# Altium footprint library Connector Header 254 Right Angel.PcbLib: 49 footprints (part 2 of 4)
Each footprint in its own frame and in the unit in brackets; x right, y up, seen from the top. Pads: shape width x height; smd on the part's side, far side on the other; paste and mask are expansions set on the pad; w line width, h text height; cw(c..) or ccw(c..) is an arc to the next point about the centre after c.
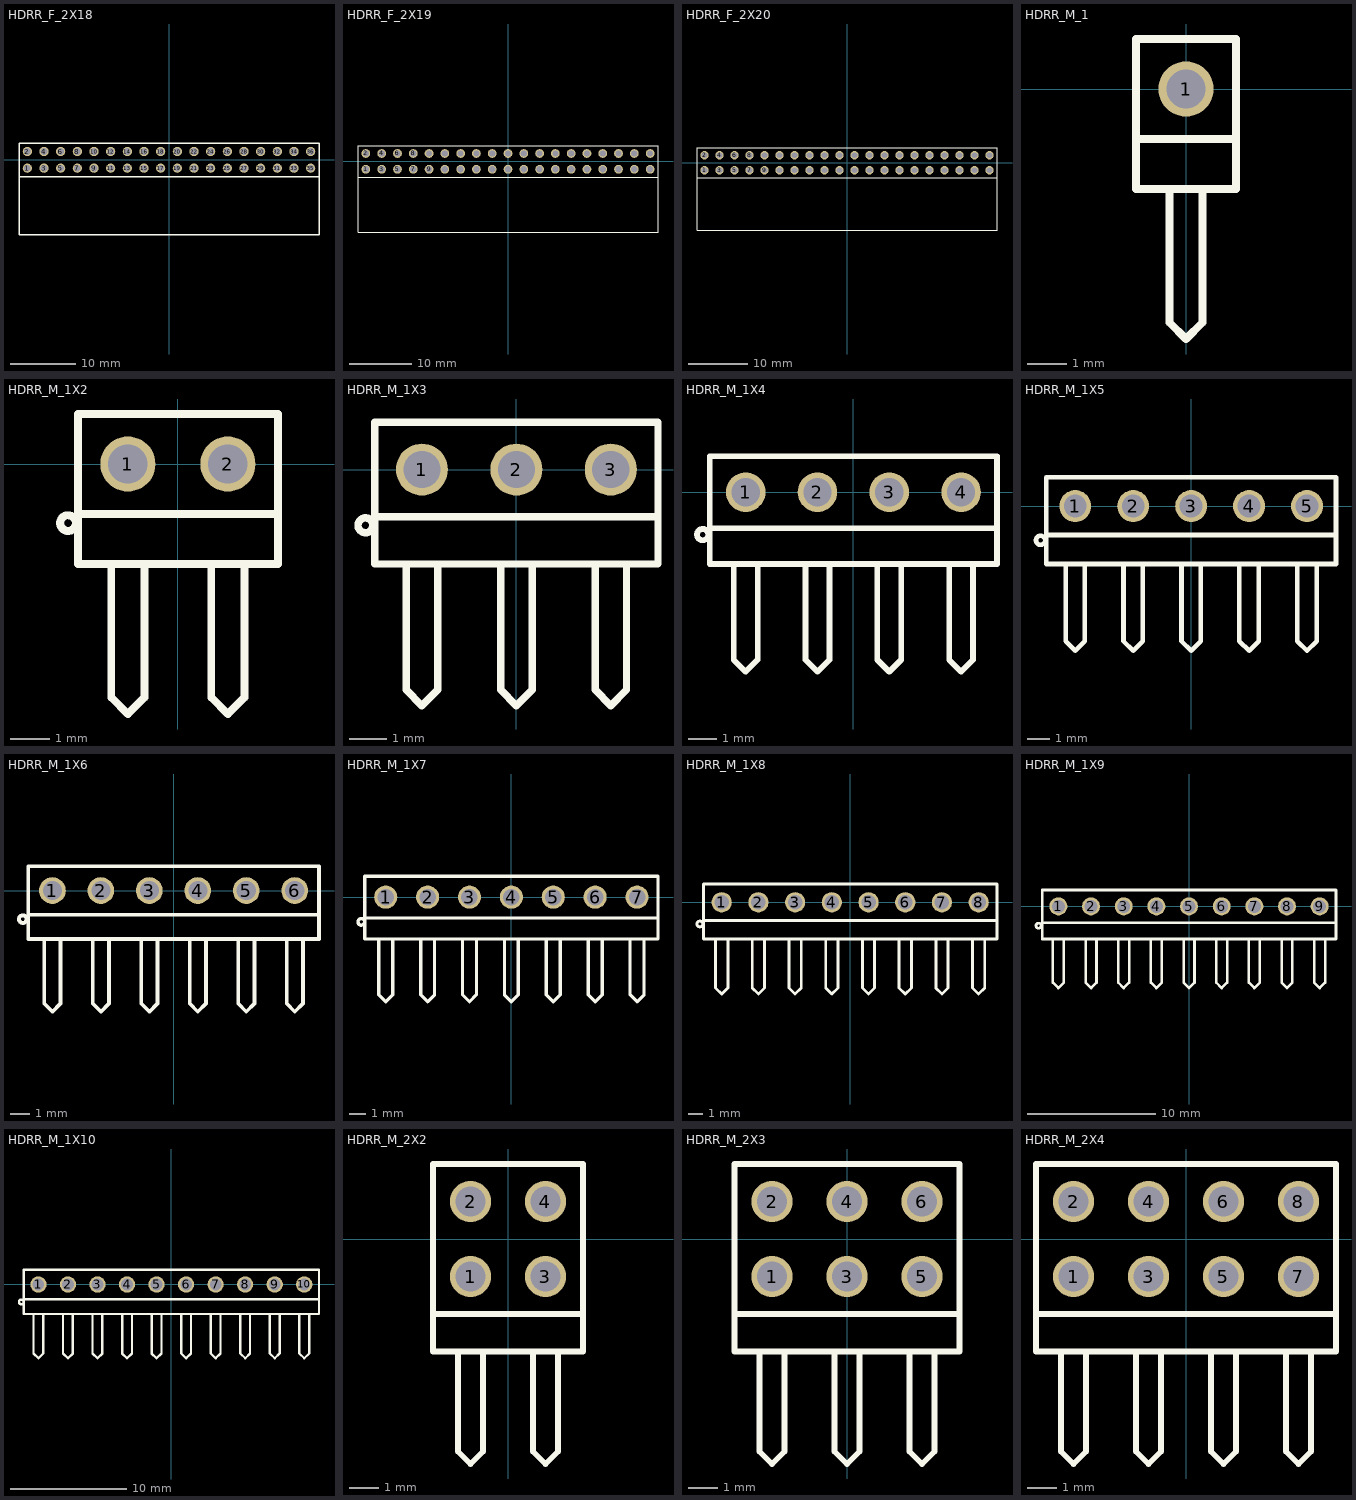
[diagram p1: the footprints below, top view; thin cyan lines are the x and y axes]

## HDRR_F_2X18 [mm] "Connector; Header; 18x2 Position"
height 5
pads (36):
  round 1.4 / inner round 1.4 / far side oval 1.4x2.2 hole 1: 1(-21.59,-1.27) 2(-21.59,1.27) 3(-19.05,-1.27) 4(-19.05,1.27) 5(-16.51,-1.27) 6(-16.51,1.27) 7(-13.97,-1.27) 8(-13.97,1.27) 9(-11.43,-1.27) 10(-11.43,1.27) 11(-8.89,-1.27) 12(-8.89,1.27) 13(-6.35,-1.27) 14(-6.35,1.27) 15(-3.81,-1.27) 16(-3.81,1.27) 17(-1.27,-1.27) 18(-1.27,1.27) 19(1.27,-1.27) 20(1.27,1.27) 21(3.81,-1.27) 22(3.81,1.27) 23(6.35,-1.27) 24(6.35,1.27) 25(8.89,-1.27) 26(8.89,1.27) 27(11.43,-1.27) 28(11.43,1.27) 29(13.97,-1.27) 30(13.97,1.27) 31(16.51,-1.27) 32(16.51,1.27) 33(19.05,-1.27) 34(19.05,1.27) 35(21.59,-1.27) 36(21.59,1.27)
Top Overlay:
  lines w0.2: -22.86,-2.54 -22.86,-11.43 22.86,-11.43 22.86,-2.54 ; -22.86,-2.54 22.86,-2.54 ; -22.86,-2.54 -22.86,2.54 22.86,2.54 22.86,-2.54
3D body "PBD-36R.step": height 5, standoff -3, extent -22.86,-11.43 22.86,1.57

## HDRR_F_2X19 [mm] "Connector; Header; 19x2 Position"
height 5
pads (38):
  round 1.4 / inner round 1.4 / far side oval 1.4x2.2 hole 1: 1(-22.86,-1.27) 2(-22.86,1.27) 3(-20.32,-1.27) 4(-20.32,1.27) 5(-17.78,-1.27) 6(-17.78,1.27) 7(-15.24,-1.27) 8(-15.24,1.27) 9(-12.7,-1.27) 10(-12.7,1.27) 11(-10.16,-1.27) 12(-10.16,1.27) 13(-7.62,-1.27) 14(-7.62,1.27) 15(-5.08,-1.27) 16(-5.08,1.27) 17(-2.54,-1.27) 18(-2.54,1.27) 19(0,-1.27) 20(0,1.27) 21(2.54,-1.27) 22(2.54,1.27) 23(5.08,-1.27) 24(5.08,1.27) 25(7.62,-1.27) 26(7.62,1.27) 27(10.16,-1.27) 28(10.16,1.27) 29(12.7,-1.27) 30(12.7,1.27) 31(15.24,-1.27) 32(15.24,1.27) 33(17.78,-1.27) 34(17.78,1.27) 35(20.32,-1.27) 36(20.32,1.27) 37(22.86,-1.27) 38(22.86,1.27)
Top Overlay:
  lines w0.2: -24.13,-2.54 -24.13,2.54 24.13,2.54 24.13,-2.54 ; -24.13,-2.54 24.13,-2.54 ; -24.13,-2.54 -24.13,-11.43 24.13,-11.43 24.13,-2.54
3D body "PBD-38R.step": height 5, standoff -3, extent -24.13,-11.43 24.13,1.57

## HDRR_F_2X20 [mm] "Connector; Header; 20x2 Position"
height 5
pads (40):
  round 1.4 / inner round 1.4 / far side oval 1.4x2.2 hole 1: 1(-24.13,-1.27) 2(-24.13,1.27) 3(-21.59,-1.27) 4(-21.59,1.27) 5(-19.05,-1.27) 6(-19.05,1.27) 7(-16.51,-1.27) 8(-16.51,1.27) 9(-13.97,-1.27) 10(-13.97,1.27) 11(-11.43,-1.27) 12(-11.43,1.27) 13(-8.89,-1.27) 14(-8.89,1.27) 15(-6.35,-1.27) 16(-6.35,1.27) 17(-3.81,-1.27) 18(-3.81,1.27) 19(-1.27,-1.27) 20(-1.27,1.27) 21(1.27,-1.27) 22(1.27,1.27) 23(3.81,-1.27) 24(3.81,1.27) 25(6.35,-1.27) 26(6.35,1.27) 27(8.89,-1.27) 28(8.89,1.27) 29(11.43,-1.27) 30(11.43,1.27) 31(13.97,-1.27) 32(13.97,1.27) 33(16.51,-1.27) 34(16.51,1.27) 35(19.05,-1.27) 36(19.05,1.27) 37(21.59,-1.27) 38(21.59,1.27) 39(24.13,-1.27) 40(24.13,1.27)
Top Overlay:
  lines w0.2: -25.4,-2.54 -25.4,2.54 25.4,2.54 25.4,-2.54 ; -25.4,-2.54 25.4,-2.54 ; -25.4,-2.54 -25.4,-11.43 25.4,-11.43 25.4,-2.54
3D body "PBD-40R.step": height 5, standoff -3, extent -25.4,-11.43 25.4,1.57

## HDRR_M_1 [mm] "Connector; Header; 1 Position; Right Angle"
height 12
pads (1):
  round 1.4 / inner round 1.4 / far side oval 1.4x2.2 hole 1: 1(0,0)
Top Overlay:
  lines w0.2: -0.423,-2.54 -0.423,-5.927 0,-6.35 0.423,-5.927 0.423,-2.54 ; -1.27,-1.27 1.27,-1.27 ; -1.27,-1.27 -1.27,-2.54 1.27,-2.54 1.27,-1.27 ; -1.27,-1.27 -1.27,1.27 1.27,1.27 1.27,-1.27
3D body "PLS-1R.step": height 5.45, standoff -3, extent -1.27,-7.35 1.27,1.27

## HDRR_M_1X2 [mm] "Connector; Header; 2 Position; Right Angle"
height 12
pads (2):
  round 1.4 / inner round 1.4 / far side oval 1.4x2.2 hole 1: 1(-1.27,0) 2(1.27,0)
Top Overlay:
  circle w0.2: c-2.79,-1.5 r0.2
  lines w0.2: -1.693,-2.54 -1.693,-5.927 -1.27,-6.35 -0.847,-5.927 -0.847,-2.54 ; 0.847,-2.54 0.847,-5.927 1.27,-6.35 1.693,-5.927 1.693,-2.54 ; 2.54,-1.27 -2.54,-1.27 ; -2.54,-2.54 -2.54,-1.27 ; -2.54,-2.54 2.54,-2.54 2.54,1.27 -2.54,1.27 ; -2.54,-2.54 -2.54,1.27 ; -2.54,-1.27 -2.54,1.27
3D body "PLS-1R.step": height 5.45, standoff -3, extent -2.54,-7.35 0,1.27
3D body "PLS-1R.step": height 5.45, standoff -3, extent 0,-7.35 2.54,1.27

## HDRR_M_1X3 [mm] "Connector; Header; 3 Position; Right Angle"
height 12
pads (3):
  round 1.4 / inner round 1.4 / far side oval 1.4x2.2 hole 1: 1(-2.54,0) 2(0,0) 3(2.54,0)
Top Overlay:
  circle w0.2: c-4.06,-1.5 r0.2
  lines w0.2: -2.963,-2.54 -2.963,-5.927 -2.54,-6.35 -2.117,-5.927 -2.117,-2.54 ; -0.423,-2.54 -0.423,-5.927 0,-6.35 0.423,-5.927 0.423,-2.54 ; 2.117,-2.54 2.117,-5.927 2.54,-6.35 2.963,-5.927 2.963,-2.54 ; 3.81,-1.27 -3.81,-1.27 ; -3.81,-2.54 -3.81,-1.27 ; -3.81,-2.54 3.81,-2.54 3.81,1.27 -3.81,1.27 ; -3.81,-2.54 -3.81,1.27 ; -3.81,-1.27 -3.81,1.27
3D body "PLS-1R.step": height 5.45, standoff -3, extent -3.81,-7.35 -1.27,1.27
3D body "PLS-1R.step": height 5.45, standoff -3, extent -1.27,-7.35 1.27,1.27
3D body "PLS-1R.step": height 5.45, standoff -3, extent 1.27,-7.35 3.81,1.27

## HDRR_M_1X4 [mm] "Connector; Header; 4 Position; Right Angle"
height 12
pads (4):
  round 1.4 / inner round 1.4 / far side oval 1.4x2.2 hole 1: 1(-3.81,0) 2(-1.27,0) 3(1.27,0) 4(3.81,0)
Top Overlay:
  circle w0.2: c-5.33,-1.5 r0.2
  lines w0.2: -4.233,-2.54 -4.233,-5.927 -3.81,-6.35 -3.387,-5.927 -3.387,-2.54 ; -1.693,-2.54 -1.693,-5.927 -1.27,-6.35 -0.847,-5.927 -0.847,-2.54 ; 0.847,-2.54 0.847,-5.927 1.27,-6.35 1.693,-5.927 1.693,-2.54 ; 3.387,-2.54 3.387,-5.927 3.81,-6.35 4.233,-5.927 4.233,-2.54 ; -5.08,-1.27 -5.08,1.27 5.08,1.27 5.08,-1.27 ; -5.08,-1.27 5.08,-1.27 ; -5.08,-1.27 5.08,-1.27 ; -5.08,-1.27 -5.08,-2.54 5.08,-2.54 5.08,-1.27
3D body "PLS-1R.step": height 5.45, standoff -3, extent -5.08,-7.35 -2.54,1.27
3D body "PLS-1R.step": height 5.45, standoff -3, extent -2.54,-7.35 0,1.27
3D body "PLS-1R.step": height 5.45, standoff -3, extent 0,-7.35 2.54,1.27
3D body "PLS-1R.step": height 5.45, standoff -3, extent 2.54,-7.35 5.08,1.27

## HDRR_M_1X5 [mm] "Connector; Header; 5 Position"
pads (5):
  round 1.4 / inner round 1.4 / far side oval 1.4x2.2 hole 1 mask+0.1: 1(-5.08,0) 2(-2.54,0) 3(0,0) 4(2.54,0) 5(5.08,0)
Top Overlay:
  circle w0.2: c-6.6,-1.5 r0.2
  lines w0.2: -5.503,-2.54 -5.503,-5.927 -5.08,-6.35 -4.657,-5.927 -4.657,-2.54 ; -2.963,-2.54 -2.963,-5.927 -2.54,-6.35 -2.117,-5.927 -2.117,-2.54 ; -0.423,-2.54 -0.423,-5.927 0,-6.35 0.423,-5.927 0.423,-2.54 ; 2.117,-2.54 2.117,-5.927 2.54,-6.35 2.963,-5.927 2.963,-2.54 ; 4.657,-2.54 4.657,-5.927 5.08,-6.35 5.503,-5.927 5.503,-2.54 ; 6.35,-1.27 -6.35,-1.27 ; -6.35,-2.54 -6.35,1.27 ; -6.35,-2.54 6.35,-2.54 6.35,1.27 -6.35,1.27 ; -6.35,-2.54 -6.35,-1.27 ; -6.35,-1.27 -6.35,1.27
3D body "PLS-1.step": height 8.54, standoff -2.9, extent -3.81,-1.27 -1.27,1.27
3D body "PLS-1.step": height 8.54, standoff -2.9, extent -6.35,-1.27 -3.81,1.27
3D body "PLS-1.step": height 8.54, standoff -2.9, extent -1.27,-1.27 1.27,1.27
3D body "PLS-1.step": height 8.54, standoff -2.9, extent 1.27,-1.27 3.81,1.27
3D body "PLS-1.step": height 8.54, standoff -2.9, extent 3.81,-1.27 6.35,1.27

## HDRR_M_1X6 [mm] "Connector; Header; 6 Position"
pads (6):
  round 1.4 / inner round 1.4 / far side oval 1.4x2.2 hole 1 mask+0.1: 1(-6.35,0) 2(-3.81,0) 3(-1.27,0) 4(1.27,0) 5(3.81,0) 6(6.35,0)
Top Overlay:
  circle w0.2: c-7.9,-1.5 r0.2
  lines w0.2: -6.773,-2.54 -6.773,-5.927 -6.35,-6.35 -5.927,-5.927 -5.927,-2.54 ; -4.233,-2.54 -4.233,-5.927 -3.81,-6.35 -3.387,-5.927 -3.387,-2.54 ; -1.693,-2.54 -1.693,-5.927 -1.27,-6.35 -0.847,-5.927 -0.847,-2.54 ; 0.847,-2.54 0.847,-5.927 1.27,-6.35 1.693,-5.927 1.693,-2.54 ; 3.387,-2.54 3.387,-5.927 3.81,-6.35 4.233,-5.927 4.233,-2.54 ; 5.927,-2.54 5.927,-5.927 6.35,-6.35 6.773,-5.927 6.773,-2.54 ; -7.62,-1.27 -7.62,-2.54 7.62,-2.54 7.62,-1.27 ; -7.62,-1.27 7.62,-1.27 ; -7.62,-1.27 -7.62,1.27 7.62,1.27 7.62,-1.27
3D body "User Library-Header_Male_6Pin.STEP": height 8.54, standoff -3, extent -7.62,-1.3 7.62,1.19

## HDRR_M_1X7 [mm] "Connector; Header; 7 Position"
pads (7):
  round 1.4 / inner round 1.4 / far side oval 1.4x2.2 hole 1 mask+0.1: 1(-7.62,0) 2(-5.08,0) 3(-2.54,0) 4(0,0) 5(2.54,0) 6(5.08,0) 7(7.62,0)
Top Overlay:
  circle w0.2: c-9.1,-1.5 r0.2
  lines w0.2: -8.043,-2.54 -8.043,-5.927 -7.62,-6.35 -7.197,-5.927 -7.197,-2.54 ; -5.503,-2.54 -5.503,-5.927 -5.08,-6.35 -4.657,-5.927 -4.657,-2.54 ; -2.963,-2.54 -2.963,-5.927 -2.54,-6.35 -2.117,-5.927 -2.117,-2.54 ; -0.423,-2.54 -0.423,-5.927 0,-6.35 0.423,-5.927 0.423,-2.54 ; 2.117,-2.54 2.117,-5.927 2.54,-6.35 2.963,-5.927 2.963,-2.54 ; 4.657,-2.54 4.657,-5.927 5.08,-6.35 5.503,-5.927 5.503,-2.54 ; 7.197,-2.54 7.197,-5.927 7.62,-6.35 8.043,-5.927 8.043,-2.54 ; 8.89,-1.27 -8.89,-1.27 ; -8.89,-2.54 -8.89,1.27 ; -8.89,-2.54 8.89,-2.54 8.89,1.27 -8.89,1.27 ; -8.89,-2.54 -8.89,-1.27 ; -8.89,-1.27 -8.89,1.27
3D body "User Library-Header_Male_7Pin.STEP": height 8.54, standoff -3, extent -8.89,-1.3 8.89,1.19

## HDRR_M_1X8 [mm] "Connector; Header; 8 Position"
pads (8):
  round 1.4 / inner round 1.4 / far side oval 1.4x2.2 hole 1 mask+0.1: 1(-8.89,0) 2(-6.35,0) 3(-3.81,0) 4(-1.27,0) 5(1.27,0) 6(3.81,0) 7(6.35,0) 8(8.89,0)
Top Overlay:
  circle w0.2: c-10.4,-1.5 r0.2
  lines w0.2: -9.313,-2.54 -9.313,-5.927 -8.89,-6.35 -8.467,-5.927 -8.467,-2.54 ; -6.773,-2.54 -6.773,-5.927 -6.35,-6.35 -5.927,-5.927 -5.927,-2.54 ; -4.233,-2.54 -4.233,-5.927 -3.81,-6.35 -3.387,-5.927 -3.387,-2.54 ; -1.693,-2.54 -1.693,-5.927 -1.27,-6.35 -0.847,-5.927 -0.847,-2.54 ; 0.847,-2.54 0.847,-5.927 1.27,-6.35 1.693,-5.927 1.693,-2.54 ; 3.387,-2.54 3.387,-5.927 3.81,-6.35 4.233,-5.927 4.233,-2.54 ; 5.927,-2.54 5.927,-5.927 6.35,-6.35 6.773,-5.927 6.773,-2.54 ; 8.467,-2.54 8.467,-5.927 8.89,-6.35 9.313,-5.927 9.313,-2.54 ; -10.16,-1.27 -10.16,1.27 10.16,1.27 10.16,-1.27 ; -10.16,-1.27 10.16,-1.27 ; -10.16,-1.27 -10.16,-2.54 10.16,-2.54 10.16,-1.27
3D body "User Library-Header_Male_8Pin.STEP": height 8.54, standoff -3, extent -10.16,-1.3 10.16,1.19

## HDRR_M_1X9 [mm] "Connector; Header; 9 Position"
pads (9):
  round 1.4 / inner round 1.4 / far side oval 1.4x2.2 hole 1 mask+0.1: 1(-10.16,0) 2(-7.62,0) 3(-5.08,0) 4(-2.54,0) 5(0,0) 6(2.54,0) 7(5.08,0) 8(7.62,0) 9(10.16,0)
Top Overlay:
  circle w0.2: c-11.7,-1.5 r0.2
  lines w0.2: -10.583,-2.54 -10.583,-5.927 -10.16,-6.35 -9.737,-5.927 -9.737,-2.54 ; -8.043,-2.54 -8.043,-5.927 -7.62,-6.35 -7.197,-5.927 -7.197,-2.54 ; -5.503,-2.54 -5.503,-5.927 -5.08,-6.35 -4.657,-5.927 -4.657,-2.54 ; -2.963,-2.54 -2.963,-5.927 -2.54,-6.35 -2.117,-5.927 -2.117,-2.54 ; -0.423,-2.54 -0.423,-5.927 0,-6.35 0.423,-5.927 0.423,-2.54 ; 2.117,-2.54 2.117,-5.927 2.54,-6.35 2.963,-5.927 2.963,-2.54 ; 4.657,-2.54 4.657,-5.927 5.08,-6.35 5.503,-5.927 5.503,-2.54 ; 7.197,-2.54 7.197,-5.927 7.62,-6.35 8.043,-5.927 8.043,-2.54 ; 9.737,-2.54 9.737,-5.927 10.16,-6.35 10.583,-5.927 10.583,-2.54 ; 11.43,-1.27 -11.43,-1.27 ; -11.43,-2.54 -11.43,1.27 ; -11.43,-2.54 11.43,-2.54 11.43,1.27 -11.43,1.27 ; -11.43,-2.54 -11.43,-1.27 ; -11.43,-1.27 -11.43,1.27
3D body "User Library-Header_Male_9Pin.STEP": height 8.54, standoff -3, extent -11.43,-1.3 11.43,1.19

## HDRR_M_1X10 [mm] "Connector; Header; 10 Position"
pads (10):
  round 1.4 / inner round 1.4 / far side oval 1.4x2.2 hole 1 mask+0.1: 1(-11.43,0) 2(-8.89,0) 3(-6.35,0) 4(-3.81,0) 5(-1.27,0) 6(1.27,0) 7(3.81,0) 8(6.35,0) 9(8.89,0) 10(11.43,0)
Top Overlay:
  circle w0.2: c-12.9,-1.5 r0.2
  lines w0.2: -11.853,-2.54 -11.853,-5.927 -11.43,-6.35 -11.007,-5.927 -11.007,-2.54 ; -9.313,-2.54 -9.313,-5.927 -8.89,-6.35 -8.467,-5.927 -8.467,-2.54 ; -6.773,-2.54 -6.773,-5.927 -6.35,-6.35 -5.927,-5.927 -5.927,-2.54 ; -4.233,-2.54 -4.233,-5.927 -3.81,-6.35 -3.387,-5.927 -3.387,-2.54 ; -1.693,-2.54 -1.693,-5.927 -1.27,-6.35 -0.847,-5.927 -0.847,-2.54 ; 0.847,-2.54 0.847,-5.927 1.27,-6.35 1.693,-5.927 1.693,-2.54 ; 3.387,-2.54 3.387,-5.927 3.81,-6.35 4.233,-5.927 4.233,-2.54 ; 5.927,-2.54 5.927,-5.927 6.35,-6.35 6.773,-5.927 6.773,-2.54 ; 8.467,-2.54 8.467,-5.927 8.89,-6.35 9.313,-5.927 9.313,-2.54 ; 11.007,-2.54 11.007,-5.927 11.43,-6.35 11.853,-5.927 11.853,-2.54 ; -12.7,-1.27 -12.7,1.27 12.7,1.27 12.7,-1.27 ; -12.7,-1.27 12.7,-1.27 ; -12.7,-1.27 -12.7,-2.54 12.7,-2.54 12.7,-1.27
3D body "User Library-Header_Male_10Pin.STEP": height 8.54, standoff -3, extent -12.7,-1.3 12.7,1.19

## HDRR_M_2X2 [mm] "Connector; Header; 2x2 Position"
height 7
pads (4):
  round 1.4 / inner round 1.4 / far side oval 1.4x2.2 hole 1: 1(-1.27,-1.27) 2(-1.27,1.27) 3(1.27,-1.27) 4(1.27,1.27)
Top Overlay:
  lines w0.2: -1.693,-3.81 -1.693,-7.197 -1.27,-7.62 -0.847,-7.197 -0.847,-3.81 ; 0.847,-3.81 0.847,-7.197 1.27,-7.62 1.693,-7.197 1.693,-3.81 ; -2.54,2.54 -2.54,-3.81 2.54,-3.81 2.54,2.54 ; -2.54,2.54 -2.54,-2.54 2.54,-2.54 2.54,2.54 ; -2.54,2.54 2.54,2.54
3D body "PLS-1R.step": height 5.45, standoff -3, extent 0,-8.62 2.54,0
3D body "PLS-1Rr.stp": height 7.99, standoff -3, extent 0,-8.62 2.54,2.54
3D body "PLS-1Rr.stp": height 7.99, standoff -3, extent -2.54,-8.62 0,2.54
3D body "PLS-1R.step": height 5.45, standoff -3, extent -2.54,-8.62 0,0

## HDRR_M_2X3 [mm] "Connector; Header; 3x2 Position"
height 7
pads (6):
  round 1.4 / inner round 1.4 / far side oval 1.4x2.2 hole 1: 1(-2.54,-1.27) 2(-2.54,1.27) 3(0,-1.27) 4(0,1.27) 5(2.54,-1.27) 6(2.54,1.27)
Top Overlay:
  lines w0.2: -2.963,-3.81 -2.963,-7.197 -2.54,-7.62 -2.117,-7.197 -2.117,-3.81 ; -0.423,-3.81 -0.423,-7.197 0,-7.62 0.423,-7.197 0.423,-3.81 ; 2.117,-3.81 2.117,-7.197 2.54,-7.62 2.963,-7.197 2.963,-3.81 ; -3.81,-2.54 -3.81,-3.81 3.81,-3.81 3.81,-2.54 ; -3.81,-2.54 -3.81,2.54 3.81,2.54 3.81,-2.54 ; -3.81,-2.54 3.81,-2.54
3D body "PLS-1R.step": height 5.45, standoff -3, extent 1.27,-8.62 3.81,0
3D body "PLS-1Rr.stp": height 7.99, standoff -3, extent 1.27,-8.62 3.81,2.54
3D body "PLS-1Rr.stp": height 7.99, standoff -3, extent -1.27,-8.62 1.27,2.54
3D body "PLS-1R.step": height 5.45, standoff -3, extent -1.27,-8.62 1.27,0
3D body "PLS-1R.step": height 5.45, standoff -3, extent -3.81,-8.62 -1.27,0
3D body "PLS-1Rr.stp": height 7.99, standoff -3, extent -3.81,-8.62 -1.27,2.54

## HDRR_M_2X4 [mm] "Connector; Header; 4x2 Position"
height 7
pads (8):
  round 1.4 / inner round 1.4 / far side oval 1.4x2.2 hole 1: 1(-3.81,-1.27) 2(-3.81,1.27) 3(-1.27,-1.27) 4(-1.27,1.27) 5(1.27,-1.27) 6(1.27,1.27) 7(3.81,-1.27) 8(3.81,1.27)
Top Overlay:
  lines w0.2: -4.233,-3.81 -4.233,-7.197 -3.81,-7.62 -3.387,-7.197 -3.387,-3.81 ; -1.693,-3.81 -1.693,-7.197 -1.27,-7.62 -0.847,-7.197 -0.847,-3.81 ; 0.847,-3.81 0.847,-7.197 1.27,-7.62 1.693,-7.197 1.693,-3.81 ; 3.387,-3.81 3.387,-7.197 3.81,-7.62 4.233,-7.197 4.233,-3.81 ; -5.08,-2.54 -5.08,-3.81 5.08,-3.81 5.08,-2.54 ; -5.08,-2.54 -5.08,2.54 5.08,2.54 5.08,-2.54 ; -5.08,-2.54 5.08,-2.54
3D body "PLS-1R.step": height 5.45, standoff -3, extent 0,-8.62 2.54,0
3D body "PLS-1Rr.stp": height 7.99, standoff -3, extent 0,-8.62 2.54,2.54
3D body "PLS-1Rr.stp": height 7.99, standoff -3, extent 2.54,-8.62 5.08,2.54
3D body "PLS-1R.step": height 5.45, standoff -3, extent 2.54,-8.62 5.08,0
3D body "PLS-1R.step": height 5.45, standoff -3, extent -5.08,-8.62 -2.54,0
3D body "PLS-1Rr.stp": height 7.99, standoff -3, extent -5.08,-8.62 -2.54,2.54
3D body "PLS-1Rr.stp": height 7.99, standoff -3, extent -2.54,-8.62 0,2.54
3D body "PLS-1R.step": height 5.45, standoff -3, extent -2.54,-8.62 0,0